# Altium footprint library main.PcbLib: 21 footprints (part 1 of 2)
Each footprint in its own frame and in the unit in brackets; x right, y up, seen from the top. Pads: shape width x height; smd on the part's side, far side on the other; paste and mask are expansions set on the pad; w line width, h text height; cw(c..) or ccw(c..) is an arc to the next point about the centre after c.
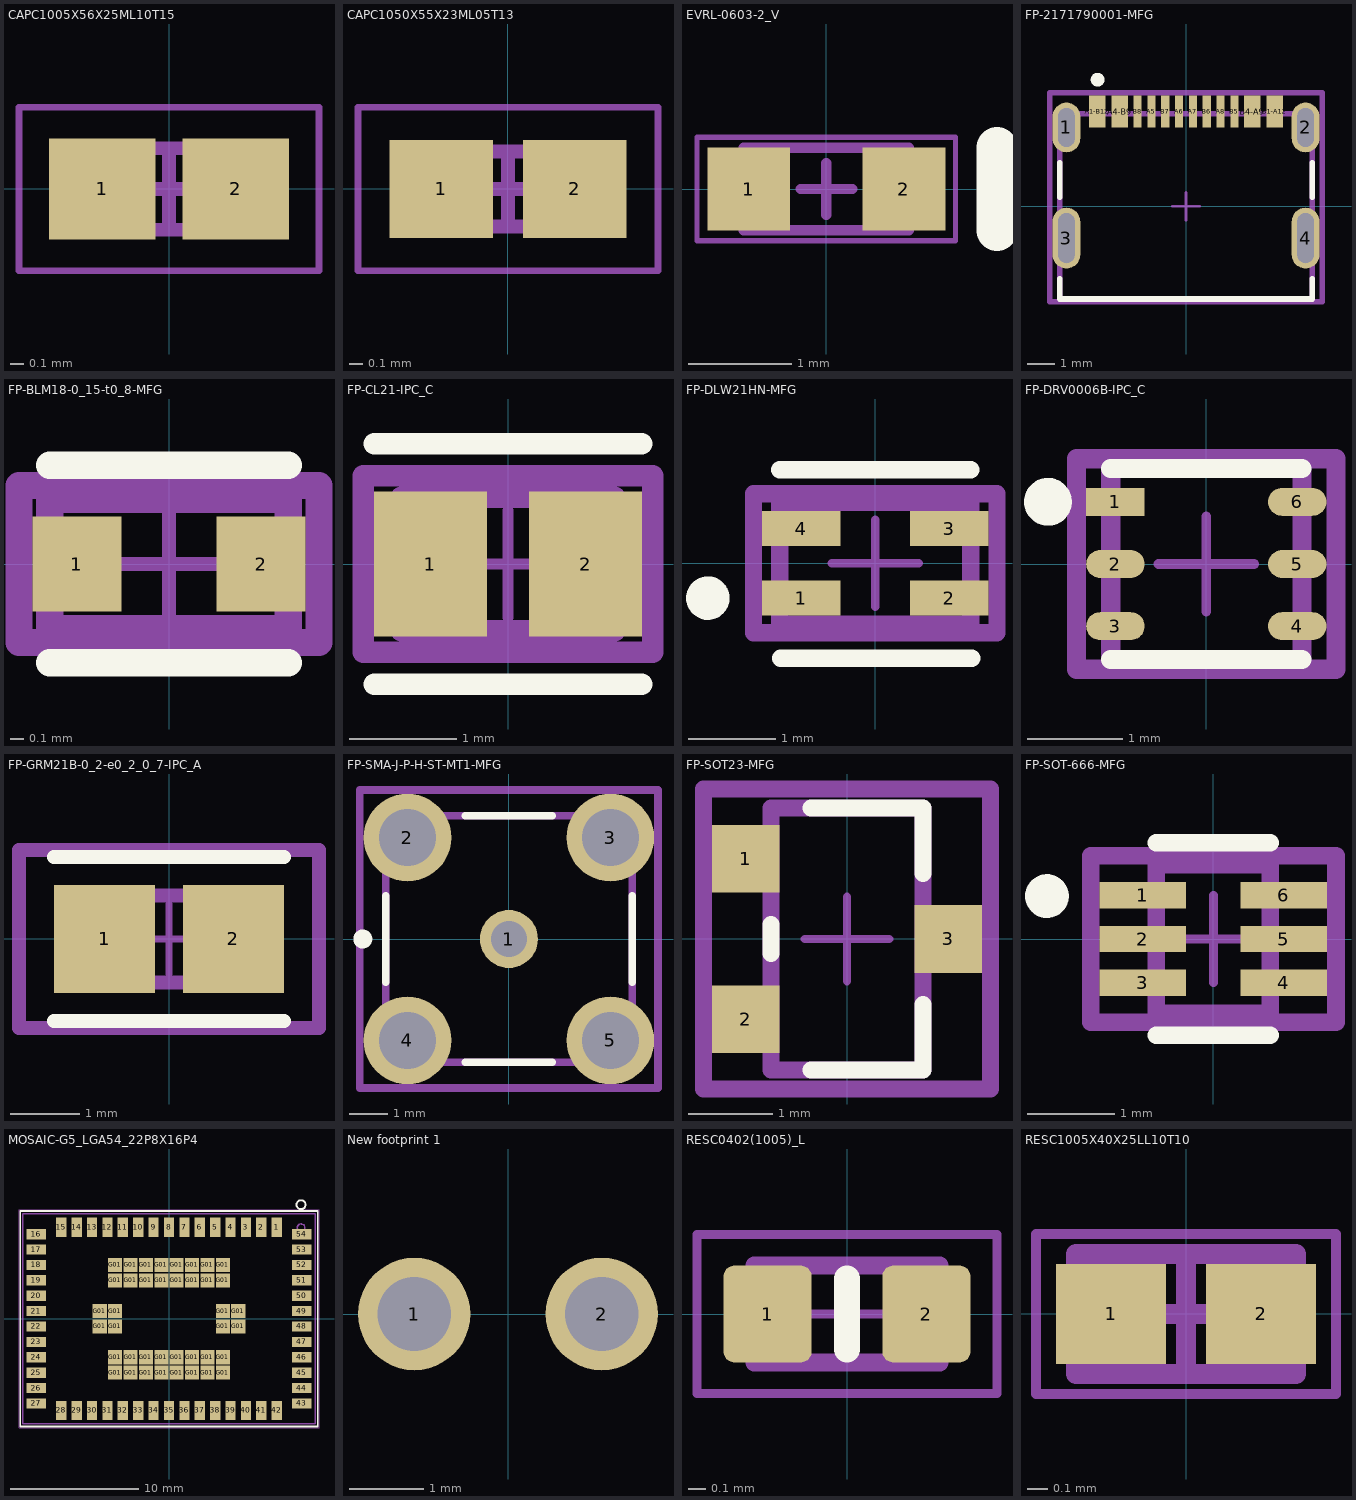
[diagram p0: the footprints below, top view; thin cyan lines are the x and y axes]

## CAPC1005X56X25ML10T15 [mm] "Chip Capacitor, 2-Leads, Body 1.10x0.60mm, IPC Low Density"
height 0.56
pads (2):
  rect 0.78x0.74 smd: 1(-0.49,0) 2(0.49,0)
Top 3D Body:
  lines w0.1: -0.55,-0.3 0.55,-0.3 0.55,0.3 -0.55,0.3 -0.55,-0.3
Top Courtyard:
  lines w0.05: -1.1,-0.6 1.1,-0.6 1.1,0.6 -1.1,0.6 -1.1,-0.6
  lines w0.1: -0.3,0 0.3,0 ; 0,-0.3 0,0.3
3D body "CAPC1005X06M.step": height 0.56, standoff 0, extent -0.55,-0.3 0.55,0.3

## CAPC1050X55X23ML05T13 [mm] "Chip Capacitor, 2-Leads, Body 1.05x0.55mm, IPC Low Density"
height 0.55
pads (2):
  rect 0.76x0.72 smd: 1(-0.49,0) 2(0.49,0)
Top 3D Body:
  lines w0.1: -0.525,-0.275 0.525,-0.275 0.525,0.275 -0.525,0.275 -0.525,-0.275
Top Courtyard:
  lines w0.05: -1.1,-0.6 1.1,-0.6 1.1,0.6 -1.1,0.6 -1.1,-0.6
  lines w0.1: -0.275,0 0.275,0 ; 0,-0.275 0,0.275
3D body: height 0.55, standoff 0, extent 0.295,-0.275 0.525,0.275
3D body: height 0.55, standoff 0, extent -0.525,-0.275 -0.295,0.275
3D body: height 0.55, standoff 0, extent -0.295,-0.275 0.295,0.275

## EVRL-0603-2_V [mm] "SMD, 2-Leads, Body 1.6x0.8mm"
height 0.5
pads (2):
  rect 0.8x0.8 smd: 1(-0.75,0) 2(0.75,0)
Top Overlay:
  lines w0.4: 1.65,-0.4 1.65,0.4
Top 3D Body:
  lines w0.1: -0.8,-0.4 0.8,-0.4 0.8,0.4 -0.8,0.4 -0.8,-0.4
Top Courtyard:
  lines w0.05: -1.25,-0.5 1.25,-0.5 1.25,0.5 -1.25,0.5 -1.25,-0.5
  lines w0.1: -0.25,0 0.25,0 ; 0,-0.25 0,0.25
3D body: height 0.15, standoff 0, extent -0.8,-0.4 0.8,0.4
3D body: height 0.5, standoff 0, extent -0.5,-0.4 0.5,0.4

## FP-2171790001-MFG [mm]
pads (16):
  rrect100% 1x1.8 hole 1.4 slot 0.6 at 0 deg paste-2539.97 mask+0: 1(-4.32,2.85) 2(4.32,2.85)
  rrect100% 1x2.2 hole 1.8 slot 0.6 at 0 deg paste-2539.97 mask+0: 3(-4.32,-1.15) 4(4.32,-1.15)
  rect 0.6x1.15 smd paste+0 mask+0: A1-B12(-3.2,3.425) A4-B9(-2.4,3.425) B1-A12(3.2,3.425) B4-A9(2.4,3.425)
  rect 0.3x1.15 smd paste+0 mask+0: A5(-1.25,3.425) A6(-0.25,3.425) A7(0.25,3.425) A8(1.25,3.425) B5(1.75,3.425) B6(0.75,3.425) B7(-0.75,3.425) B8(-1.75,3.425)
Top Overlay:
  circle w0.25: c-3.195,4.575 r0.125
  lines w0.2: -4.57,-2.625 -4.57,-3.35 4.57,-3.35 4.57,-2.625 ; -4.57,0.325 -4.57,1.575 ; 4.57,0.325 4.57,1.575
Top Assembly:
  lines w0.2: -4.92,-3.45 -4.92,4.1 4.92,4.1 4.92,-3.45 -4.92,-3.45
  text ".Designator" at 0,0.513 h1
Top 3D Body:
  lines w0.2: -4.57,-3.35 -4.57,3.35 4.57,3.35 4.57,-3.35 -4.57,-3.35
Top Courtyard:
  lines w0.2: -4.92,-3.45 -4.92,4.1 4.92,4.1 4.92,-3.45 -4.92,-3.45
Top Component Center:
  lines w0.1: -0.5,0 0.5,0 ; 0,-0.5 0,0.5
3D body "Conn_Molex_2171790001_eec.STEP": height 0.25, standoff 0, extent -4.92,-3.45 4.92,4.1

## FP-BLM18-0_15-t0_8-MFG [mm]
pads (2):
  rect 0.65x0.7 smd paste+0 mask+0: 1(-0.675,0) 2(0.675,0)
Top Overlay:
  lines w0.2: -0.875,-0.725 0.875,-0.725 ; -0.875,0.725 0.875,0.725
Top Assembly:
  lines w0.2: -1.1,-0.575 1.1,-0.575 1.1,0.575 -1.1,0.575 -1.1,-0.575
  text ".Designator" at 0,0.188 h1
Top 3D Body:
  lines w0.2: -0.875,-0.475 0.875,-0.475 0.875,0.475 -0.875,0.475 -0.875,-0.475
Top Courtyard:
  lines w0.2: -1.1,-0.575 1.1,-0.575 1.1,0.575 -1.1,0.575 -1.1,-0.575
Top Component Center:
  lines w0.1: -0.5,0 0.5,0 ; 0,-0.5 0,0.5
3D body "FBead_Murata_BLM18SP300SZ1D_eec.STEP": height 0.25, standoff 0, extent -1.1,-0.575 1.1,0.575

## FP-CL21-IPC_C [mm]
pads (2):
  rect 1.055x1.356 smd paste+0 mask+0: 1(-0.726,0) 2(0.726,0)
Top Overlay:
  lines w0.2: -1.253,-1.125 1.253,-1.125 ; -1.253,1.125 1.253,1.125
Top Assembly:
  lines w0.2: -1.353,-0.825 1.353,-0.825 1.353,0.825 -1.353,0.825 -1.353,-0.825
  text ".Designator" at 0,0.188 h1
Top 3D Body:
  lines w0.2: -1,-0.625 1,-0.625 1,0.625 -1,0.625 -1,-0.625
Top Courtyard:
  lines w0.2: -1.353,-0.825 1.353,-0.825 1.353,0.825 -1.353,0.825 -1.353,-0.825
Top Component Center:
  lines w0.1: -0.5,0 0.5,0 ; 0,-0.5 0,0.5
3D body "Cap_Samsung_CL21B273KBANNNC_eec.STEP": height 0.25, standoff 0, extent -1.353,-0.825 1.353,0.825

## FP-DLW21HN-MFG [mm]
pads (4):
  rect 0.9x0.4 smd paste-1000 mask+0: 1(-0.85,-0.4) 2(0.85,-0.4) 3(0.85,0.4) 4(-0.85,0.4)
Top Overlay:
  circle w0.25: c-1.925,-0.4 r0.125
  lines w0.2: -1.1,1.075 1.1,1.075 ; -1.09,-1.09 1.11,-1.09
Top Paste:
  rectangle: 0.4,-0.6 1.3,-0.25
  rectangle: -1.3,-0.6 -0.4,-0.25
  rectangle: 0.4,0.25 1.3,0.6
  rectangle: -1.3,0.25 -0.4,0.6
Top Assembly:
  lines w0.2: -1.4,-0.8 -1.4,0.8 1.4,0.8 1.4,-0.8 -1.4,-0.8
  text ".Designator" at 0,0.188 h1
Top 3D Body:
  lines w0.2: -1.1,-0.7 -1.1,0.7 1.1,0.7 1.1,-0.7 -1.1,-0.7
Top Courtyard:
  lines w0.2: -1.4,-0.8 -1.4,0.8 1.4,0.8 1.4,-0.8 -1.4,-0.8
Top Component Center:
  lines w0.1: -0.5,0 0.5,0 ; 0,-0.5 0,0.5
3D body "Ind_Murata_DLW21HN670HQ2B_eec.STEP": height 0.25, standoff 0, extent -1.4,-0.8 1.4,0.8

## FP-DRV0006B-IPC_C [mm]
pads (6):
  rect 0.611x0.292 smd paste+0 mask+0: 1(-0.951,0.65)
  rrect100% 0.611x0.292 smd paste+0 mask+0: 2(-0.951,0) 3(-0.951,-0.65) 4(0.951,-0.65) 5(0.951,0) 6(0.951,0.65)
Top Overlay:
  circle w0.25: c-1.656,0.65 r0.125
  lines w0.2: -1,-1 1,-1 ; -1,1 1,1
Top Assembly:
  lines w0.2: -1.356,-1.1 1.356,-1.1 1.356,1.1 -1.356,1.1 -1.356,-1.1
  text ".Designator" at 0,-0.001 h1
Top 3D Body:
  lines w0.2: -1,-1 1,-1 1,1 -1,1 -1,-1
Top Courtyard:
  lines w0.2: -1.356,-1.1 1.356,-1.1 1.356,1.1 -1.356,1.1 -1.356,-1.1
Top Component Center:
  lines w0.1: -0.5,0 0.5,0 ; 0,-0.5 0,0.5
3D body "IC_Texas_Instruments_TMP116NAIDRVR_eec.STEP": height 0.25, standoff 0, extent -1.356,-1.1 1.356,1.1

## FP-GRM21B-0_2-e0_2_0_7-IPC_A [mm]
pads (2):
  rect 1.455x1.556 smd paste+0 mask+0: 1(-0.926,0) 2(0.926,0)
Top Overlay:
  lines w0.2: -1.653,-1.178 1.653,-1.178 ; -1.653,1.178 1.653,1.178
Top Assembly:
  lines w0.2: -2.153,-1.278 2.153,-1.278 2.153,1.278 -2.153,1.278 -2.153,-1.278
  text ".Designator" at 0,0.188 h1
Top 3D Body:
  lines w0.2: -1,-0.625 1,-0.625 1,0.625 -1,0.625 -1,-0.625
Top Courtyard:
  lines w0.2: -2.153,-1.278 2.153,-1.278 2.153,1.278 -2.153,1.278 -2.153,-1.278
Top Component Center:
  lines w0.1: -0.5,0 0.5,0 ; 0,-0.5 0,0.5
3D body "Cap_Murata_GRM21BC71C106KE11L_eec.STEP": height 0.25, standoff 0, extent -2.153,-1.278 2.153,1.278

## FP-SMA-J-P-H-ST-MT1-MFG [mm]
pads (5):
  round 1.524 hole 0.95: 1(0,0)
  round 2.3 hole 1.5 paste-2539.97 mask+0: 2(-2.665,2.665) 3(2.665,2.665) 4(-2.665,-2.665) 5(2.665,-2.665)
Top Overlay:
  circle w0.25: c-3.84,0 r0.125
  lines w0.2: -3.24,-1.14 -3.24,1.14 ; -1.14,-3.24 1.14,-3.24 ; -1.14,3.24 1.14,3.24 ; 3.24,-1.14 3.24,1.14
Top Assembly:
  lines w0.2: -3.915,-3.915 3.915,-3.915 3.915,3.915 -3.915,3.915 -3.915,-3.915
  text ".Designator" at 0,0.188 h1
Top 3D Body:
  lines w0.2: -3.24,-3.24 3.24,-3.24 3.24,3.24 -3.24,3.24 -3.24,-3.24
Top Courtyard:
  lines w0.2: -3.915,-3.915 3.915,-3.915 3.915,3.915 -3.915,3.915 -3.915,-3.915
Top Component Center:
  lines w0.1: -0.5,0 0.5,0 ; 0,-0.5 0,0.5
3D body "Conn_Samtec_SMA-J-P-H-ST-MT1_eec.STEP": height 0.25, standoff 0, extent -3.915,-3.915 3.915,3.915

## FP-SOT23-MFG [mm]
pads (3):
  rect 0.8x0.8 smd paste+0 mask+0: 1(-1.2,0.95) 2(-1.2,-0.95) 3(1.2,0)
Top Overlay:
  lines w0.2: -0.9,-0.175 -0.9,0.175 ; -0.425,-1.55 0.9,-1.55 0.9,-0.775 ; -0.425,1.55 0.9,1.55 0.9,0.775
Top Assembly:
  lines w0.2: -1.7,-1.777 1.7,-1.777 1.7,1.777 -1.7,1.777 -1.7,-1.777
  text ".Designator" at 0,-0.001 h1
Top 3D Body:
  lines w0.2: -0.9,-1.55 0.9,-1.55 0.9,1.55 -0.9,1.55 -0.9,-1.55
Top Courtyard:
  lines w0.2: -1.7,-1.777 1.7,-1.777 1.7,1.777 -1.7,1.777 -1.7,-1.777
Top Component Center:
  lines w0.1: -0.5,0 0.5,0 ; 0,-0.5 0,0.5
3D body "Trans_Alpha_&_Omega_Semiconductor_AO3400A_eec.STEP": height 0.25, standoff 0, extent -1.7,-1.777 1.7,1.777

## FP-SOT-666-MFG [mm]
pads (6):
  rect 0.99x0.3 smd paste+0 mask+0: 1(-0.805,0.5) 2(-0.805,0) 3(-0.805,-0.5) 4(0.805,-0.5) 5(0.805,0) 6(0.805,0.5)
Top Overlay:
  circle w0.25: c-1.9,0.49 r0.125
  lines w0.2: -0.65,-1.1 0.65,-1.1 ; -0.65,1.1 0.65,1.1
Top Assembly:
  lines w0.2: -1.4,-0.95 -1.4,0.95 1.4,0.95 1.4,-0.95 -1.4,-0.95
  text ".Designator" at 0,0.188 h1
Top 3D Body:
  lines w0.2: -0.65,-0.85 -0.65,0.85 0.65,0.85 0.65,-0.85 -0.65,-0.85
Top Courtyard:
  lines w0.2: -1.4,-0.95 -1.4,0.95 1.4,0.95 1.4,-0.95 -1.4,-0.95
Top Component Center:
  lines w0.1: -0.5,0 0.5,0 ; 0,-0.5 0,0.5
3D body "Diode_STMicroelectronics_DSILC6-4P6_eec.STEP": height 0.25, standoff 0, extent -1.4,-0.95 1.4,0.95

## MOSAIC-G5_LGA54_22P8X16P4 [mm] "Septentrio mosaic-G5 family LGA: 54 numbered perimeter pads plus 40 internal ground lands, 22.80 x 16.40 x 2.40 mm. Copper geometry and 0.05 mm NSMD solder-mask expansion follow mosaic-G5 Hardware Manual v2.0.0. Internal lands use designators G01-G40 and map collectively to schematic pin G. Paste apertures remain governed by the PCB paste-mask rule."
pads (94):
  rect 0.8x1.5 smd mask+0.05: 1(8.4,7.15) 2(7.2,7.15) 3(6,7.15) 4(4.8,7.15) 5(3.6,7.15) 6(2.4,7.15) 7(1.2,7.15) 8(0,7.15) 9(-1.2,7.15) 10(-2.4,7.15) 11(-3.6,7.15) 12(-4.8,7.15) 13(-6,7.15) 14(-7.2,7.15) 15(-8.4,7.15) 28(-8.4,-7.15) 29(-7.2,-7.15) 30(-6,-7.15) 31(-4.8,-7.15) 32(-3.6,-7.15) 33(-2.4,-7.15) 34(-1.2,-7.15) 35(0,-7.15) 36(1.2,-7.15) 37(2.4,-7.15) 38(3.6,-7.15) 39(4.8,-7.15) 40(6,-7.15) 41(7.2,-7.15) 42(8.4,-7.15)
  rect 1.5x0.8 smd mask+0.05: 16(-10.35,6.6) 17(-10.35,5.4) 18(-10.35,4.2) 19(-10.35,3) 20(-10.35,1.8) 21(-10.35,0.6) 22(-10.35,-0.6) 23(-10.35,-1.8) 24(-10.35,-3) 25(-10.35,-4.2) 26(-10.35,-5.4) 27(-10.35,-6.6) 43(10.35,-6.6) 44(10.35,-5.4) 45(10.35,-4.2) 46(10.35,-3) 47(10.35,-1.8) 48(10.35,-0.6) 49(10.35,0.6) 50(10.35,1.8) 51(10.35,3) 52(10.35,4.2) 53(10.35,5.4) 54(10.35,6.6)
  rect 1.1x1.1 smd mask+0.05: G01(-5.4,-0.6) G01(-5.4,0.6) G01(-4.2,-4.2) G01(-4.2,-3) G01(-4.2,-0.6) G01(-4.2,0.6) G01(-4.2,3) G01(-4.2,4.2) G01(-3,-4.2) G01(-3,-3) G01(-3,3) G01(-3,4.2) G01(-1.8,-4.2) G01(-1.8,-3) G01(-1.8,3) G01(-1.8,4.2) G01(-0.6,-4.2) G01(-0.6,-3) G01(-0.6,3) G01(-0.6,4.2) G01(0.6,-4.2) G01(0.6,-3) G01(0.6,3) G01(0.6,4.2) G01(1.8,-4.2) G01(1.8,-3) G01(1.8,3) G01(1.8,4.2) G01(3,-4.2) G01(3,-3) G01(3,3) G01(3,4.2) G01(4.2,-4.2) G01(4.2,-3) G01(4.2,-0.6) G01(4.2,0.6) G01(4.2,3) G01(4.2,4.2) G01(5.4,-0.6) G01(5.4,0.6)
Top Overlay:
  circle w0.15: c10.3,8.9 r0.35
  lines w0.15: -11.6,-8.4 -11.6,8.4 11.6,8.4 11.6,-8.4 -11.6,-8.4
Top Assembly:
  circle w0.1: c10.3,7.1 r0.3
  lines w0.1: -11.4,-8.2 -11.4,8.2 11.4,8.2 11.4,-8.2 -11.4,-8.2
  text "mosaic-G5" at 0,0 h1.2
Top Courtyard:
  lines w0.05: -11.7,-8.5 -11.7,8.5 11.7,8.5 11.7,-8.5 -11.7,-8.5
3D body: height 2.4, standoff 0, extent -11.4,-8.2 11.4,8.2
3D body "Septentrio_mosaic-G5-T.step": height 2.4, standoff 0, extent -11.4,-8.2 11.4,8.2

## New footprint 1 [mil]
pads (2):
  round 60 hole 39.37: 1(-50,0) 2(50,0)

## RESC0402(1005)_L [mm] "Chip Resistor, Body 1.0x0.5mm, IPC High Density"
height 0.4
pads (2):
  rrect25% 0.5x0.55 smd: 1(-0.45,0) 2(0.45,0)
Top Overlay:
  lines w0.15: 0,-0.2 0,0.2
Top 3D Body:
  lines w0.1: -0.525,-0.275 0.525,-0.275 0.525,0.275 -0.525,0.275 -0.525,-0.275
Top Courtyard:
  lines w0.05: -0.275,0 0.275,0 ; 0,-0.275 0,0.275 ; -0.85,-0.45 0.85,-0.45 0.85,0.45 -0.85,0.45 -0.85,-0.45
Mechanical 19:
  text ".Designator" at -1.27,-0.127 h0.6
3D body "RES0402.step": height 0.3, standoff 0, extent -0.5,-0.25 0.5,0.25

## RESC1005X40X25LL10T10 [mm] "Chip Resistor, 2-Leads, Body 1.00x0.50mm, IPC High Density"
height 0.4
pads (2):
  rect 0.55x0.5 smd: 1(-0.375,0) 2(0.375,0)
Top 3D Body:
  lines w0.1: -0.55,-0.3 0.55,-0.3 0.55,0.3 -0.55,0.3 -0.55,-0.3
Top Courtyard:
  lines w0.05: -0.75,-0.4 0.75,-0.4 0.75,0.4 -0.75,0.4 -0.75,-0.4
  lines w0.1: -0.3,0 0.3,0 ; 0,-0.3 0,0.3
3D body: height 0.4, standoff 0, extent 0.3,-0.3 0.55,0.3
3D body: height 0.4, standoff 0, extent -0.55,-0.3 -0.3,0.3
3D body: height 0.4, standoff 0, extent -0.3,-0.3 0.3,0.3